# Altium schematic symbol library QNCT03.SchLib: 1 symbol
Pins are listed as number, name and electrical type; pins without a type are passive.

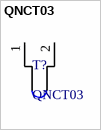
[diagram p0: symbol QNCT03]

## QNCT03
designator T?
High Precision Current Transformer QNCT03L  100A 25mA  4000:1
footprint QNCT03L (Current Transformer QNCT03L)
pins: 1 3, 2 4